# Altium footprint library Footprint-Lib-PhilsLab.PcbLib: 352 footprints (part 4 of 22)
Each footprint in its own frame and in the unit in brackets; x right, y up, seen from the top. Pads: shape width x height; smd on the part's side, far side on the other; paste and mask are expansions set on the pad; w line width, h text height; cw(c..) or ccw(c..) is an arc to the next point about the centre after c.
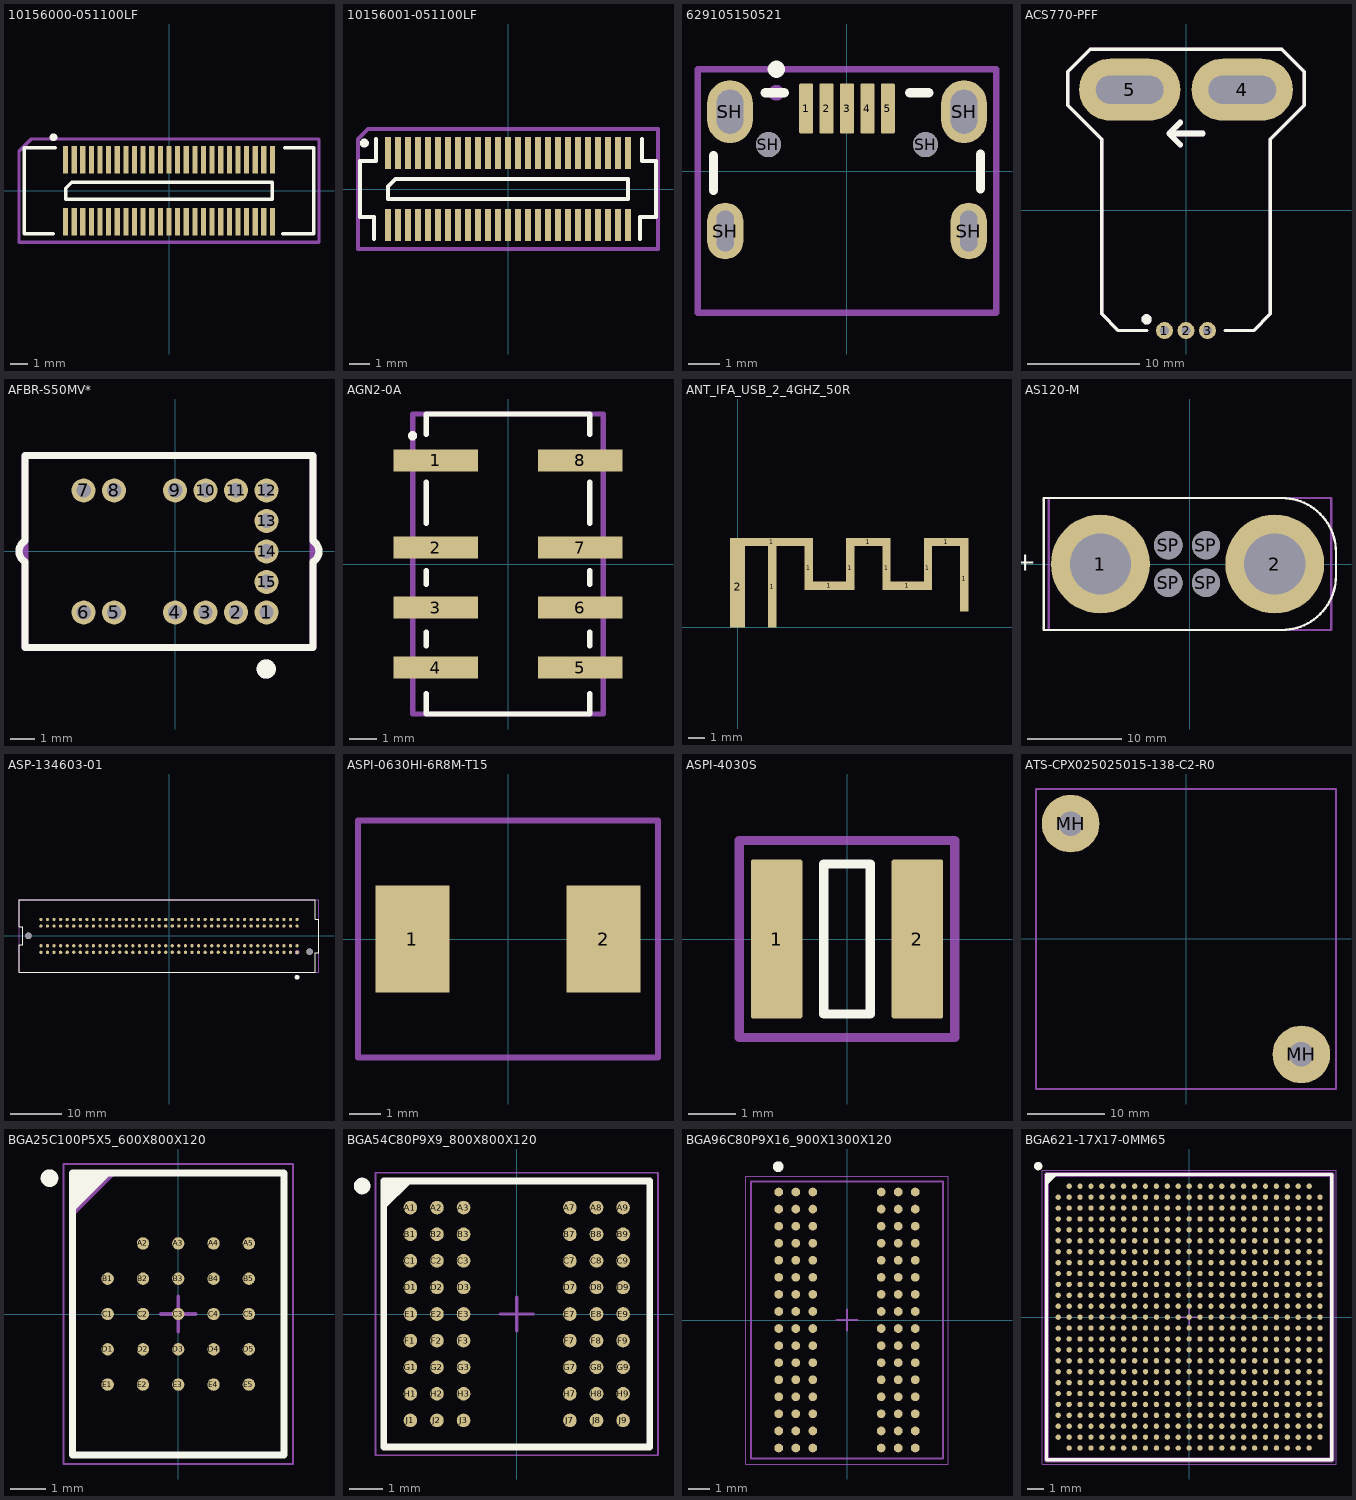
[diagram p3: the footprints below, top view; thin cyan lines are the x and y axes]

## 10156000-051100LF [mm]
pads (50):
  rect 0.3x1.6 smd mask+0.05: 1(-6,1.8) 2(-5.5,1.8) 3(-5,1.8) 4(-4.5,1.8) 5(-4,1.8) 6(-3.5,1.8) 7(-3,1.8) 8(-2.5,1.8) 9(-2,1.8) 10(-1.5,1.8) 11(-1,1.8) 12(-0.5,1.8) 13(0,1.8) 14(0.5,1.8) 15(1,1.8) 16(1.5,1.8) 17(2,1.8) 18(2.5,1.8) 19(3,1.8) 20(3.5,1.8) 21(4,1.8) 22(4.5,1.8) 23(5,1.8) 24(5.5,1.8) 25(6,1.8) 26(6,-1.8) 27(5.5,-1.8) 28(5,-1.8) 29(4.5,-1.8) 30(4,-1.8) 31(3.5,-1.8) 32(3,-1.8) 33(2.5,-1.8) 34(2,-1.8) 35(1.5,-1.8) 36(1,-1.8) 37(0.5,-1.8) 38(0,-1.8) 39(-0.5,-1.8) 40(-1,-1.8) 41(-1.5,-1.8) 42(-2,-1.8) 43(-2.5,-1.8) 44(-3,-1.8) 45(-3.5,-1.8) 46(-4,-1.8) 47(-4.5,-1.8) 48(-5,-1.8) 49(-5.5,-1.8) 50(-6,-1.8)
Top Overlay:
  circle w0.25: c-6.7,3.1 r0.1
  lines w0.2: -6.7,-2.5 -8.4,-2.5 -8.4,2.5 -6.6,2.5 ; 6.6,-2.5 8.4,-2.5 8.4,2.5 6.7,2.5 ; -6,-0.5 6,-0.5 6,0.5 -5.635,0.5 -6,0.135 -6,-0.5
Mechanical 13:
  lines w0.2: -8.7,-3 -8.7,-0.4 -8.7,2.3 -8,3 8.7,3 8.7,-3 -8.7,-3
  text "'.Designator'" at -7.947,-1.41 h0.8
3D body "10156000-051100LF.stp": height 2.76, standoff 0.01, extent -8.15,-2.3 8.15,2.3

## 10156001-051100LF [mm]
pads (50):
  rect 0.3x1.6 smd mask+0.05: 1(-6,1.8) 2(-5.5,1.8) 3(-5,1.8) 4(-4.5,1.8) 5(-4,1.8) 6(-3.5,1.8) 7(-3,1.8) 8(-2.5,1.8) 9(-2,1.8) 10(-1.5,1.8) 11(-1,1.8) 12(-0.5,1.8) 13(0,1.8) 14(0.5,1.8) 15(1,1.8) 16(1.5,1.8) 17(2,1.8) 18(2.5,1.8) 19(3,1.8) 20(3.5,1.8) 21(4,1.8) 22(4.5,1.8) 23(5,1.8) 24(5.5,1.8) 25(6,1.8) 26(6,-1.8) 27(5.5,-1.8) 28(5,-1.8) 29(4.5,-1.8) 30(4,-1.8) 31(3.5,-1.8) 32(3,-1.8) 33(2.5,-1.8) 34(2,-1.8) 35(1.5,-1.8) 36(1,-1.8) 37(0.5,-1.8) 38(0,-1.8) 39(-0.5,-1.8) 40(-1,-1.8) 41(-1.5,-1.8) 42(-2,-1.8) 43(-2.5,-1.8) 44(-3,-1.8) 45(-3.5,-1.8) 46(-4,-1.8) 47(-4.5,-1.8) 48(-5,-1.8) 49(-5.5,-1.8) 50(-6,-1.8)
Top Overlay:
  circle w0.25: c-7.185,2.298 r0.1
  lines w0.2: -6.7,-2.5 -6.7,-1.4 -7.4,-1.4 -7.4,1.4 -6.6,1.4 -6.6,2.5 ; 6.6,-2.5 6.6,-1.4 7.4,-1.4 7.4,1.4 6.7,1.4 6.7,2.5 ; -6,-0.5 6,-0.5 6,0.5 -5.635,0.5 -6,0.135 -6,-0.5
Mechanical 13:
  lines w0.2: -7.5,-3 -7.5,-1 -7.5,2.5 -7,3 7.5,3 7.5,-3 -7.5,-3
  text "'.Designator'" at -7.947,-1.41 h0.8
3D body "10156001-051100LF.stp": height 2.8, standoff 0.01, extent -7.175,-2.3 7.175,2.3

## 629105150521 [mm]
height 2.35
pads (11):
  rrect25% 0.45x1.6 smd mask+0.12: 1(-1.3,2) 2(-0.65,2) 3(0,2) 4(0.65,2) 5(1.3,2)
  oval 1.15x1.8 hole 0.55 slot 1.3 at 90 deg: SH(-3.875,-1.9) SH(3.875,-1.9)
  oval 1.45x2 hole 0.85 slot 1.4 at 90 deg mask+0.15: SH(-3.725,1.9) SH(3.725,1.9)
  round 0.8 hole 0.8 unplated mask+0.3: SH(-2.5,0.85) SH(2.5,0.85)
Top Overlay:
  circle w0.3: c-2.25,3.25 r0.125
  lines w0.3: -4.25,-0.6 -4.25,0.5 ; -2.6,2.5 -2,2.5 ; 2,2.5 2.6,2.5 ; 4.25,-0.55 4.25,0.55
Mechanical 13:
  circle w0.3: c-2.25,2.5 r0.1
  lines w0.2: -4.75,-4.5 -4.75,3.25 4.75,3.25 4.75,-4.5 -4.75,-4.5
  text ".Designator" at -4.998,-0.333 h1
3D body "629105150521.stp": height 2.78, standoff -1.75, extent -4,-4.3 4,2.303

## ACS770-PFF [mm]
pads (5):
  round 1.5 hole 0.8: 1(-1.91,-10.7) 2(0,-10.7) 3(1.91,-10.7)
  oval 9x5.5 hole 2.5 slot 6 at 0 deg: 4(5,10.7) 5(-5,10.7)
Top Overlay:
  circle w0.5: c-3.5,-9.7 r0.203
  lines w0.3: -3.5,-10.7 -6,-10.7 -7.5,-9.2 -7.5,0.8 -7.5,6.3 -10.5,9.3 -10.5,12.3 -8.5,14.3 0,14.3 8.5,14.3 10.5,12.3 10.5,9.3 8.5,7.3 7.5,6.3 7.5,-9.2 6,-10.7 3.5,-10.7
  lines w0.5: -0.5,5.8 -1.5,6.8 ; -0.5,7.8 -1.5,6.8 ; 1.5,6.8 -1.5,6.8
Mechanical 13:
  circle w0.5: c-3.5,-9.7 r0.203
  lines w0.3: -3.5,-10.7 -6,-10.7 -7.5,-9.2 -7.5,0.8 -7.5,6.3 -10.5,9.3 -10.5,12.3 -8.5,14.3 0,14.3 8.5,14.3 10.5,12.3 10.5,9.3 8.5,7.3 7.5,6.3 7.5,-9.2 6,-10.7 3.5,-10.7
  lines w0.5: -0.5,5.8 -1.5,6.8 ; -0.5,7.8 -1.5,6.8 ; 1.5,6.8 -1.5,6.8
  text "'.Designator'" at -6.315,-1.4 h1
3D body "ACS770-PFF.STEP": height 7.01, standoff -3.52, extent -7.002,-11.214 6.998,11.603

## AFBR-S50MV* [mm]
pads (15):
  round 1 hole 0.6: 1(3.81,-2.54) 2(2.54,-2.54) 3(1.27,-2.54) 4(0,-2.54) 5(-2.54,-2.54) 6(-3.81,-2.54) 7(-3.81,2.54) 8(-2.54,2.54) 9(0,2.54) 10(1.27,2.54) 11(2.54,2.54) 12(3.81,2.54) 13(3.81,1.27) 14(3.81,0) 15(3.81,-1.27)
Top Overlay:
  circle w0.5: c3.8,-4.9 r0.15
  lines w0.3: -6.254,-0.43 cw(c-6,0) -6.251,0.432 ; -6.25,-0.5 -6.25,-4 5.75,-4 5.75,-0.435 ccw(c5.747,-0.435) 5.747,-0.432 ccw(c5.496,0) 5.75,0.43 5.75,4 -6.25,4 -6.25,0.5
Mechanical 13:
  circle w0.5: c3.8,-4.9 r0.15
  lines w0.3: -6.25,-4 5.75,-4 5.75,4 -6.25,4 -6.25,-4
  text "'.Designator'" at -5.665,-0.417 h1
3D body "AFBR-S50MV85G.stp": height 7.71, standoff -4.29, extent -6.42,-3.8 5.98,3.8

## AGN2-0A [mm]
pads (8):
  rect 3.1x0.8 smd: 1(-2.65,3.8) 2(-2.65,0.6) 3(-2.65,-1.6) 4(-2.65,-3.8) 5(2.65,-3.8) 6(2.65,-1.6) 7(2.65,0.6) 8(2.65,3.8)
Top Overlay:
  circle w0.3: c-3.5,4.7 r0.021
  lines w0.2: -3,-4.75 -3,-5.5 3,-5.5 3,-4.75 ; -3,-3 -3,-2.5 ; -3,-0.75 -3,-0.25 ; -3,1.5 -3,3 ; -3,4.75 -3,5.5 3,5.5 3,4.75 ; 3,-3 3,-2.5 ; 3,-0.75 3,-0.25 ; 3,1.5 3,3
Mechanical 13:
  circle w0.3: c-2.2,3.8 r0.108
  lines w0.2: -3.5,-5.5 -3.5,5.5 3.5,5.5 3.5,-5.5 -3.5,-5.5
  text ".Designator" at -4.998,-0.333 h1
3D body "agn210a12.step": height 10.04, standoff 0.04, extent -3.7,-5.3 3.7,5.3

## ANT_IFA_USB_2_4GHZ_50R [mm]
pads (12):
  rect 5x0.5 smd paste-2539.97 mask+0.102: 1(2.05,5.15)
  rect 0.5x4.9 smd paste-2539.97 mask+0.102: 1(2.1,2.45)
  rect 0.5x2.64 smd paste-2539.97 mask+0.102: 1(4.3,3.58) 1(6.8,3.58) 1(9,3.58) 1(11.5,3.58)
  rect 2x0.5 smd paste-2539.97 mask+0.102: 1(5.55,2.51) 1(10.25,2.51)
  rect 2.7x0.5 smd paste-2539.97 mask+0.102: 1(7.9,5.15) 1(12.6,5.15)
  rect 0.5x3.94 smd paste-2539.97 mask+0.102: 1(13.7,2.93)
  rect 0.9x4.9 smd paste-2539.97 mask+0.102: 2(0,2.45)

## AS120-M [mm]
pads (6):
  round 10.5 hole 6.5: 1(-9.5,0) 2(9,0)
  round 3 hole 3 unplated: SP(-2.3,-2) SP(-2.3,2) SP(1.7,-2) SP(1.7,2)
Top Overlay:
  lines w0.254: -15.5,-7 -15.5,0 -15.5,7 9.764,7 cw(c9.764,1.264) 15.5,1.264 15.5,-1.264 cw(c9.764,-1.264) 9.764,-7 -15.5,-7
  text "+" at -16.334,1 h2
Mechanical 13:
  lines w0.254: -15,-7 -15,7 15,7 15,-7 -15,-7
  text "'.Designator'" at -5.665,-0.417 h1
  text "+" at -10.5,-1.5 h3
3D body "AS120-M.STEP": height 26, standoff -5, extent -14.975,-6.7 15,6.7

## ASP-134603-01 [mm]
height 6.55
pads (162):
  round 0.64 smd: C1(24.765,-3.175) C2(23.495,-3.175) C3(22.225,-3.175) C4(20.955,-3.175) C5(19.685,-3.175) C6(18.415,-3.175) C7(17.145,-3.175) C8(15.875,-3.175) C9(14.605,-3.175) C10(13.335,-3.175) C11(12.065,-3.175) C12(10.795,-3.175) C13(9.525,-3.175) C14(8.255,-3.175) C15(6.985,-3.175) C16(5.715,-3.175) C17(4.445,-3.175) C18(3.175,-3.175) C19(1.905,-3.175) C20(0.635,-3.175) C21(-0.635,-3.175) C22(-1.905,-3.175) C23(-3.175,-3.175) C24(-4.445,-3.175) C25(-5.715,-3.175) C26(-6.985,-3.175) C27(-8.255,-3.175) C28(-9.525,-3.175) C29(-10.795,-3.175) C30(-12.065,-3.175) C31(-13.335,-3.175) C32(-14.605,-3.175) C33(-15.875,-3.175) C34(-17.145,-3.175) C35(-18.415,-3.175) C36(-19.685,-3.175) C37(-20.955,-3.175) C38(-22.225,-3.175) C39(-23.495,-3.175) C40(-24.765,-3.175) D1(24.765,-1.905) D2(23.495,-1.905) D3(22.225,-1.905) D4(20.955,-1.905) D5(19.685,-1.905) D6(18.415,-1.905) D7(17.145,-1.905) D8(15.875,-1.905) D9(14.605,-1.905) D10(13.335,-1.905) D11(12.065,-1.905) D12(10.795,-1.905) D13(9.525,-1.905) D14(8.255,-1.905) D15(6.985,-1.905) D16(5.715,-1.905) D17(4.445,-1.905) D18(3.175,-1.905) D19(1.905,-1.905) D20(0.635,-1.905) D21(-0.635,-1.905) D22(-1.905,-1.905) D23(-3.175,-1.905) D24(-4.445,-1.905) D25(-5.715,-1.905) D26(-6.985,-1.905) D27(-8.255,-1.905) D28(-9.525,-1.905) D29(-10.795,-1.905) D30(-12.065,-1.905) D31(-13.335,-1.905) D32(-14.605,-1.905) D33(-15.875,-1.905) D34(-17.145,-1.905) D35(-18.415,-1.905) D36(-19.685,-1.905) D37(-20.955,-1.905) D38(-22.225,-1.905) D39(-23.495,-1.905) D40(-24.765,-1.905) G1(24.765,1.905) G2(23.495,1.905) G3(22.225,1.905) G4(20.955,1.905) G5(19.685,1.905) G6(18.415,1.905) G7(17.145,1.905) G8(15.875,1.905) G9(14.605,1.905) G10(13.335,1.905) G11(12.065,1.905) G12(10.795,1.905) G13(9.525,1.905) G14(8.255,1.905) G15(6.985,1.905) G16(5.715,1.905) G17(4.445,1.905) G18(3.175,1.905) G19(1.905,1.905) G20(0.635,1.905) G21(-0.635,1.905) G22(-1.905,1.905) G23(-3.175,1.905) G24(-4.445,1.905) G25(-5.715,1.905) G26(-6.985,1.905) G27(-8.255,1.905) G28(-9.525,1.905) G29(-10.795,1.905) G30(-12.065,1.905) G31(-13.335,1.905) G32(-14.605,1.905) G33(-15.875,1.905) G34(-17.145,1.905) G35(-18.415,1.905) G36(-19.685,1.905) G37(-20.955,1.905) G38(-22.225,1.905) G39(-23.495,1.905) G40(-24.765,1.905) H1(24.765,3.175) H2(23.495,3.175) H3(22.225,3.175) H4(20.955,3.175) H5(19.685,3.175) H6(18.415,3.175) H7(17.145,3.175) H8(15.875,3.175) H9(14.605,3.175) H10(13.335,3.175) H11(12.065,3.175) H12(10.795,3.175) H13(9.525,3.175) H14(8.255,3.175) H15(6.985,3.175) H16(5.715,3.175) H17(4.445,3.175) H18(3.175,3.175) H19(1.905,3.175) H20(0.635,3.175) H21(-0.635,3.175) H22(-1.905,3.175) H23(-3.175,3.175) H24(-4.445,3.175) H25(-5.715,3.175) H26(-6.985,3.175) H27(-8.255,3.175) H28(-9.525,3.175) H29(-10.795,3.175) H30(-12.065,3.175) H31(-13.335,3.175) H32(-14.605,3.175) H33(-15.875,3.175) H34(-17.145,3.175) H35(-18.415,3.175) H36(-19.685,3.175) H37(-20.955,3.175) H38(-22.225,3.175) H39(-23.495,3.175) H40(-24.765,3.175)
  round 1.27 hole 1.27 unplated: MH(-27.18,0) MH(27.18,-3.05)
Top Overlay:
  circle w0.5: c24.75,-8 r0.2
  lines w0.2: -29,-7 -29,-1.75 -28.25,-1.75 -28.25,1.75 -29,1.75 -29,7 0,7 28.25,7 28.25,3.25 29,3.25 29,-3.25 28.25,-3.25 28.25,-7 0,-7 -29,-7
Mechanical 13:
  circle w0.5: c24.765,-3.175 r0.2
  lines w0.2: -29,-7 -29,7 29,7 29,-7 -29,-7
  text "'.Designator'" at -5.665,-0.417 h1
3D body "ASP-134603-01.stp": height 6.57, standoff -1.26, extent -28.727,-6.642 28.727,6.642

## ASPI-0630HI-6R8M-T15 [mm]
pads (2):
  rect 2.35x3.4 smd: 1(-3.025,0) 2(3.025,0)
Mechanical 13:
  lines w0.2: -4.75,-3.75 -4.75,-2 -4.75,3.75 4.75,3.75 4.75,-3.75 -4.75,-3.75
  text "'.Designator'" at -4.682,-0.75 h0.8
3D body "ASPI-0630HI.STEP": height 3.01, standoff 0.01, extent -3.6,-3.325 3.6,3.325

## ASPI-4030S [mm]
pads (2):
  rrect10% 1.1x3.4 smd: 1(-1.5,0) 2(1.5,0)
Top Overlay:
  lines w0.2: -0.5,-1.6 -0.5,1.6 0.5,1.6 0.5,-1.6 -0.5,-1.6
Mechanical 13:
  lines w0.2: -2.3,-2.1 -2.3,2.1 2.3,2.1 2.3,-2.1 0,-2.1 -2.3,-2.1
  text ".Designator" at -4.998,-0.333 h1
3D body "ASPI-4030S.STEP": height 3.01, standoff 0.01, extent -2,-2 2,2

## ATS-CPX025025015-138-C2-R0 [mm]
pads (2):
  round 7.5 hole 3.175: MH(-15,15) MH(15,-15)
Mechanical 13:
  lines w0.2: -19.5,-19.5 -19.5,19.5 19.5,19.5 19.5,-19.5 -19.5,-19.5
  text "'.Designator'" at -5.665,-0.417 h1
3D body "ATS-CPX-138-CX-R0_FUSED.STEP": height 18.5, standoff 3.5, extent -18.996,-18.996 18.996,18.996

## BGA25C100P5X5_600X800X120 [mm] "BGA, 25-Leads, Body 6.00x8.00mmx1.20mm, Pitch 1.00mm"
height 1.2
pads (24):
  round 0.35 smd: A2(-1,2) A3(0,2) A4(1,2) A5(2,2) B1(-2,1) B2(-1,1) B3(0,1) B4(1,1) B5(2,1) C1(-2,0) C2(-1,0) C3(0,0) C4(1,0) C5(2,0) D1(-2,-1) D2(-1,-1) D3(0,-1) D4(1,-1) D5(2,-1) E1(-2,-2) E2(-1,-2) E3(0,-2) E4(1,-2) E5(2,-2)
Top Overlay:
  circle w0.25: c-3.65,3.85 r0.125
  region: -2,4 -3,3 -3,4
  lines w0.2: -3,3 -2,4 ; -3,-4 3,-4 3,4 -3,4 -3,-4
Mechanical 13:
  lines w0.1: -3,-4 -3,2.8 -1.8,4 3,4 3,-4 -3,-4
  text "'.Designator'" at -5.84,-0.925 h1
Mechanical 15:
  lines w0.05: -3.25,-4.25 3.25,-4.25 3.25,4.25 -3.25,4.25 -3.25,-4.25
  lines w0.1: -0.5,0 0.5,0 ; 0,-0.5 0,0.5
3D body "BGA25C100P5X5_600X800X120.step": height 1.2, standoff 0, extent -3,-4 3,4

## BGA54C80P9X9_800X800X120 [mm] "BGA, 54-Leads, Body 8.00x8.00mmx1.20mm, Pitch 0.80mm"
height 1.2
pads (54):
  round 0.41 smd: A1(-3.2,3.2) A2(-2.4,3.2) A3(-1.6,3.2) A7(1.6,3.2) A8(2.4,3.2) A9(3.2,3.2) B1(-3.2,2.4) B2(-2.4,2.4) B3(-1.6,2.4) B7(1.6,2.4) B8(2.4,2.4) B9(3.2,2.4) C1(-3.2,1.6) C2(-2.4,1.6) C3(-1.6,1.6) C7(1.6,1.6) C8(2.4,1.6) C9(3.2,1.6) D1(-3.2,0.8) D2(-2.4,0.8) D3(-1.6,0.8) D7(1.6,0.8) D8(2.4,0.8) D9(3.2,0.8) E1(-3.2,0) E2(-2.4,0) E3(-1.6,0) E7(1.6,0) E8(2.4,0) E9(3.2,0) F1(-3.2,-0.8) F2(-2.4,-0.8) F3(-1.6,-0.8) F7(1.6,-0.8) F8(2.4,-0.8) F9(3.2,-0.8) G1(-3.2,-1.6) G2(-2.4,-1.6) G3(-1.6,-1.6) G7(1.6,-1.6) G8(2.4,-1.6) G9(3.2,-1.6) H1(-3.2,-2.4) H2(-2.4,-2.4) H3(-1.6,-2.4) H7(1.6,-2.4) H8(2.4,-2.4) H9(3.2,-2.4) J1(-3.2,-3.2) J2(-2.4,-3.2) J3(-1.6,-3.2) J7(1.6,-3.2) J8(2.4,-3.2) J9(3.2,-3.2)
Top Overlay:
  circle w0.25: c-4.65,3.85 r0.125
  region: -3.256,4 -4,3.256 -4,4
  lines w0.2: -4,3.256 -3.256,4 ; -4,-4 4,-4 4,4 -4,4 -4,-4
Mechanical 13:
  lines w0.1: -4,-4 4,-4 4,4 -4,4 -4,-4
  text "'.Designator'" at -5.815,-0.9 h1
Mechanical 15:
  lines w0.05: -4.25,-4.25 4.25,-4.25 4.25,4.25 -4.25,4.25 -4.25,-4.25
  lines w0.1: -0.5,0 0.5,0 ; 0,-0.5 0,0.5
3D body "BGA54C80P9X9_800X800X120.step": height 1.2, standoff 0, extent -4,-4 4,4

## BGA96C80P9X16_900X1300X120 [mm] "BGA, 96-Leads, Body 9.00x13.00mmx1.20mm, Pitch 0.80mm"
height 1.2
pads (96):
  round 0.41 smd mask+0.05: A1(-3.2,6) A2(-2.4,6) A3(-1.6,6) A7(1.6,6) A8(2.4,6) A9(3.2,6) B1(-3.2,5.2) B2(-2.4,5.2) B3(-1.6,5.2) B7(1.6,5.2) B8(2.4,5.2) B9(3.2,5.2) C1(-3.2,4.4) C2(-2.4,4.4) C3(-1.6,4.4) C7(1.6,4.4) C8(2.4,4.4) C9(3.2,4.4) D1(-3.2,3.6) D2(-2.4,3.6) D3(-1.6,3.6) D7(1.6,3.6) D8(2.4,3.6) D9(3.2,3.6) E1(-3.2,2.8) E2(-2.4,2.8) E3(-1.6,2.8) E7(1.6,2.8) E8(2.4,2.8) E9(3.2,2.8) F1(-3.2,2) F2(-2.4,2) F3(-1.6,2) F7(1.6,2) F8(2.4,2) F9(3.2,2) G1(-3.2,1.2) G2(-2.4,1.2) G3(-1.6,1.2) G7(1.6,1.2) G8(2.4,1.2) G9(3.2,1.2) H1(-3.2,0.4) H2(-2.4,0.4) H3(-1.6,0.4) H7(1.6,0.4) H8(2.4,0.4) H9(3.2,0.4) J1(-3.2,-0.4) J2(-2.4,-0.4) J3(-1.6,-0.4) J7(1.6,-0.4) J8(2.4,-0.4) J9(3.2,-0.4) K1(-3.2,-1.2) K2(-2.4,-1.2) K3(-1.6,-1.2) K7(1.6,-1.2) K8(2.4,-1.2) K9(3.2,-1.2) L1(-3.2,-2) L2(-2.4,-2) L3(-1.6,-2) L7(1.6,-2) L8(2.4,-2) L9(3.2,-2) M1(-3.2,-2.8) M2(-2.4,-2.8) M3(-1.6,-2.8) M7(1.6,-2.8) M8(2.4,-2.8) M9(3.2,-2.8) N1(-3.2,-3.6) N2(-2.4,-3.6) N3(-1.6,-3.6) N7(1.6,-3.6) N8(2.4,-3.6) N9(3.2,-3.6) P1(-3.2,-4.4) P2(-2.4,-4.4) P3(-1.6,-4.4) P7(1.6,-4.4) P8(2.4,-4.4) P9(3.2,-4.4) R1(-3.2,-5.2) R2(-2.4,-5.2) R3(-1.6,-5.2) R7(1.6,-5.2) R8(2.4,-5.2) R9(3.2,-5.2) T1(-3.2,-6) T2(-2.4,-6) T3(-1.6,-6) T7(1.6,-6) T8(2.4,-6) T9(3.2,-6)
Top Overlay:
  circle w0.25: c-3.226,7.188 r0.125
Mechanical 13:
  lines w0.1: -4.5,-6.5 4.5,-6.5 4.5,6.5 -4.5,6.5 -4.5,-6.5
  text "'.Designator'" at -5.84,-0.925 h1
Mechanical 15:
  lines w0.05: -4.75,-6.75 4.75,-6.75 4.75,6.75 -4.75,6.75 -4.75,-6.75
  lines w0.1: -0.5,0 0.5,0 ; 0,-0.5 0,0.5
3D body "BGA96C80P9X16_900X1300X120.step": height 1.2, standoff 0, extent -4.5,-6.5 4.5,6.5

## BGA621-17X17-0MM65 [mm]
height 2.18
pads (621):
  round 0.32 smd mask+0.07: A2(-7.15,7.8) A3(-6.5,7.8) A4(-5.85,7.8) A5(-5.2,7.8) A6(-4.55,7.8) A7(-3.9,7.8) A8(-3.25,7.8) A9(-2.6,7.8) A10(-1.95,7.8) A11(-1.3,7.8) A12(-0.65,7.8) A13(0,7.8) A14(0.65,7.8) A15(1.3,7.8) A16(1.95,7.8) A17(2.6,7.8) A18(3.25,7.8) A19(3.9,7.8) A20(4.55,7.8) A21(5.2,7.8) A22(5.85,7.8) A23(6.5,7.8) A24(7.15,7.8) AA1(-7.8,-5.2) AA2(-7.15,-5.2) AA3(-6.5,-5.2) AA4(-5.85,-5.2) AA5(-5.2,-5.2) AA6(-4.55,-5.2) AA7(-3.9,-5.2) AA8(-3.25,-5.2) AA9(-2.6,-5.2) AA10(-1.95,-5.2) AA11(-1.3,-5.2) AA12(-0.65,-5.2) AA13(0,-5.2) AA14(0.65,-5.2) AA15(1.3,-5.2) AA16(1.95,-5.2) AA17(2.6,-5.2) AA18(3.25,-5.2) AA19(3.9,-5.2) AA20(4.55,-5.2) AA21(5.2,-5.2) AA22(5.85,-5.2) AA23(6.5,-5.2) AA24(7.15,-5.2) AA25(7.8,-5.2) AB1(-7.8,-5.85) AB2(-7.15,-5.85) AB3(-6.5,-5.85) AB4(-5.85,-5.85) AB5(-5.2,-5.85) AB6(-4.55,-5.85) AB7(-3.9,-5.85) AB8(-3.25,-5.85) AB9(-2.6,-5.85) AB10(-1.95,-5.85) AB11(-1.3,-5.85) AB12(-0.65,-5.85) AB13(0,-5.85) AB14(0.65,-5.85) AB15(1.3,-5.85) AB16(1.95,-5.85) AB17(2.6,-5.85) AB18(3.25,-5.85) AB19(3.9,-5.85) AB20(4.55,-5.85) AB21(5.2,-5.85) AB22(5.85,-5.85) AB23(6.5,-5.85) AB24(7.15,-5.85) AB25(7.8,-5.85) AC1(-7.8,-6.5) AC2(-7.15,-6.5) AC3(-6.5,-6.5) AC4(-5.85,-6.5) AC5(-5.2,-6.5) AC6(-4.55,-6.5) AC7(-3.9,-6.5) AC8(-3.25,-6.5) AC9(-2.6,-6.5) AC10(-1.95,-6.5) AC11(-1.3,-6.5) AC12(-0.65,-6.5) AC13(0,-6.5) AC14(0.65,-6.5) AC15(1.3,-6.5) AC16(1.95,-6.5) AC17(2.6,-6.5) AC18(3.25,-6.5) AC19(3.9,-6.5) AC20(4.55,-6.5) AC21(5.2,-6.5) AC22(5.85,-6.5) AC23(6.5,-6.5) AC24(7.15,-6.5) AC25(7.8,-6.5) AD1(-7.8,-7.15) AD2(-7.15,-7.15) AD3(-6.5,-7.15) AD4(-5.85,-7.15) AD5(-5.2,-7.15) AD6(-4.55,-7.15) AD7(-3.9,-7.15) AD8(-3.25,-7.15) AD9(-2.6,-7.15) AD10(-1.95,-7.15) AD11(-1.3,-7.15) AD12(-0.65,-7.15) AD13(0,-7.15) AD14(0.65,-7.15) AD15(1.3,-7.15) AD16(1.95,-7.15) AD17(2.6,-7.15) AD18(3.25,-7.15) AD19(3.9,-7.15) AD20(4.55,-7.15) AD21(5.2,-7.15) AD22(5.85,-7.15) AD23(6.5,-7.15) AD24(7.15,-7.15) AD25(7.8,-7.15) AE2(-7.15,-7.8) AE3(-6.5,-7.8) AE4(-5.85,-7.8) AE5(-5.2,-7.8) AE6(-4.55,-7.8) AE7(-3.9,-7.8) AE8(-3.25,-7.8) AE9(-2.6,-7.8) AE10(-1.95,-7.8) AE11(-1.3,-7.8) AE12(-0.65,-7.8) AE13(0,-7.8) AE14(0.65,-7.8) AE15(1.3,-7.8) AE16(1.95,-7.8) AE17(2.6,-7.8) AE18(3.25,-7.8) AE19(3.9,-7.8) AE20(4.55,-7.8) AE21(5.2,-7.8) AE22(5.85,-7.8) AE23(6.5,-7.8) AE24(7.15,-7.8) B1(-7.8,7.15) B2(-7.15,7.15) B3(-6.5,7.15) B4(-5.85,7.15) B5(-5.2,7.15) B6(-4.55,7.15) B7(-3.9,7.15) B8(-3.25,7.15) B9(-2.6,7.15) B10(-1.95,7.15) B11(-1.3,7.15) B12(-0.65,7.15) B13(0,7.15) B14(0.65,7.15) B15(1.3,7.15) B16(1.95,7.15) B17(2.6,7.15) B18(3.25,7.15) B19(3.9,7.15) B20(4.55,7.15) B21(5.2,7.15) B22(5.85,7.15) B23(6.5,7.15) B24(7.15,7.15) B25(7.8,7.15) C1(-7.8,6.5) C2(-7.15,6.5) C3(-6.5,6.5) C4(-5.85,6.5) C5(-5.2,6.5) C6(-4.55,6.5) C7(-3.9,6.5) C8(-3.25,6.5) C9(-2.6,6.5) C10(-1.95,6.5) C11(-1.3,6.5) C12(-0.65,6.5) C13(0,6.5) C14(0.65,6.5) C15(1.3,6.5) C16(1.95,6.5) C17(2.6,6.5) C18(3.25,6.5) C19(3.9,6.5) C20(4.55,6.5) C21(5.2,6.5) C22(5.85,6.5) C23(6.5,6.5) C24(7.15,6.5) C25(7.8,6.5) D1(-7.8,5.85) D2(-7.15,5.85) D3(-6.5,5.85) D4(-5.85,5.85) D5(-5.2,5.85) D6(-4.55,5.85) D7(-3.9,5.85) D8(-3.25,5.85) D9(-2.6,5.85) D10(-1.95,5.85) D11(-1.3,5.85) D12(-0.65,5.85) D13(0,5.85) D14(0.65,5.85) D15(1.3,5.85) D16(1.95,5.85) D17(2.6,5.85) D18(3.25,5.85) D19(3.9,5.85) D20(4.55,5.85) D21(5.2,5.85) D22(5.85,5.85) D23(6.5,5.85) D24(7.15,5.85) D25(7.8,5.85) E1(-7.8,5.2) E2(-7.15,5.2) E3(-6.5,5.2) E4(-5.85,5.2) E5(-5.2,5.2) E6(-4.55,5.2) E7(-3.9,5.2) E8(-3.25,5.2) E9(-2.6,5.2) E10(-1.95,5.2) E11(-1.3,5.2) E12(-0.65,5.2) E13(0,5.2) E14(0.65,5.2) E15(1.3,5.2) E16(1.95,5.2) E17(2.6,5.2) E18(3.25,5.2) E19(3.9,5.2) E20(4.55,5.2) E21(5.2,5.2) E22(5.85,5.2) E23(6.5,5.2) E24(7.15,5.2) E25(7.8,5.2) F1(-7.8,4.55) F2(-7.15,4.55) F3(-6.5,4.55) F4(-5.85,4.55) F5(-5.2,4.55) F6(-4.55,4.55) F7(-3.9,4.55) F8(-3.25,4.55) F9(-2.6,4.55) F10(-1.95,4.55) F11(-1.3,4.55) F12(-0.65,4.55) F13(0,4.55) F14(0.65,4.55) F15(1.3,4.55) F16(1.95,4.55) F17(2.6,4.55) F18(3.25,4.55) F19(3.9,4.55) F20(4.55,4.55) F21(5.2,4.55) F22(5.85,4.55) F23(6.5,4.55) F24(7.15,4.55) F25(7.8,4.55) G1(-7.8,3.9) G2(-7.15,3.9) G3(-6.5,3.9) G4(-5.85,3.9) G5(-5.2,3.9) G6(-4.55,3.9) G7(-3.9,3.9) G8(-3.25,3.9) G9(-2.6,3.9) G10(-1.95,3.9) G11(-1.3,3.9) G12(-0.65,3.9) G13(0,3.9) G14(0.65,3.9) G15(1.3,3.9) G16(1.95,3.9) G17(2.6,3.9) G18(3.25,3.9) G19(3.9,3.9) G20(4.55,3.9) G21(5.2,3.9) G22(5.85,3.9) G23(6.5,3.9) G24(7.15,3.9) G25(7.8,3.9) H1(-7.8,3.25) H2(-7.15,3.25) H3(-6.5,3.25) H4(-5.85,3.25) H5(-5.2,3.25) H6(-4.55,3.25) H7(-3.9,3.25) H8(-3.25,3.25) H9(-2.6,3.25) H10(-1.95,3.25) H11(-1.3,3.25) H12(-0.65,3.25) H13(0,3.25) H14(0.65,3.25) H15(1.3,3.25) H16(1.95,3.25) H17(2.6,3.25) H18(3.25,3.25) H19(3.9,3.25) H20(4.55,3.25) H21(5.2,3.25) H22(5.85,3.25) H23(6.5,3.25) H24(7.15,3.25) H25(7.8,3.25) J1(-7.8,2.6) J2(-7.15,2.6) J3(-6.5,2.6) J4(-5.85,2.6) J5(-5.2,2.6) J6(-4.55,2.6) J7(-3.9,2.6) J8(-3.25,2.6) J9(-2.6,2.6) J10(-1.95,2.6) J11(-1.3,2.6) J12(-0.65,2.6) J13(0,2.6) J14(0.65,2.6) J15(1.3,2.6) J16(1.95,2.6) J17(2.6,2.6) J18(3.25,2.6) J19(3.9,2.6) J20(4.55,2.6) J21(5.2,2.6) J22(5.85,2.6) J23(6.5,2.6) J24(7.15,2.6) J25(7.8,2.6) K1(-7.8,1.95) K2(-7.15,1.95) K3(-6.5,1.95) K4(-5.85,1.95) K5(-5.2,1.95) K6(-4.55,1.95) K7(-3.9,1.95) K8(-3.25,1.95) K9(-2.6,1.95) K10(-1.95,1.95) K11(-1.3,1.95) K12(-0.65,1.95) K13(0,1.95) K14(0.65,1.95) K15(1.3,1.95) K16(1.95,1.95) K17(2.6,1.95) K18(3.25,1.95) K19(3.9,1.95) K20(4.55,1.95) K21(5.2,1.95) K22(5.85,1.95) K23(6.5,1.95) K24(7.15,1.95) K25(7.8,1.95) L1(-7.8,1.3) L2(-7.15,1.3) L3(-6.5,1.3) L4(-5.85,1.3) L5(-5.2,1.3) L6(-4.55,1.3) L7(-3.9,1.3) L8(-3.25,1.3) L9(-2.6,1.3) L10(-1.95,1.3) L11(-1.3,1.3) L12(-0.65,1.3) L13(0,1.3) L14(0.65,1.3) L15(1.3,1.3) L16(1.95,1.3) L17(2.6,1.3) L18(3.25,1.3) L19(3.9,1.3) L20(4.55,1.3) L21(5.2,1.3) L22(5.85,1.3) L23(6.5,1.3) L24(7.15,1.3) L25(7.8,1.3) M1(-7.8,0.65) M2(-7.15,0.65) M3(-6.5,0.65) M4(-5.85,0.65) M5(-5.2,0.65) M6(-4.55,0.65) M7(-3.9,0.65) M8(-3.25,0.65) M9(-2.6,0.65) M10(-1.95,0.65) M11(-1.3,0.65) M12(-0.65,0.65) M13(0,0.65) M14(0.65,0.65) M15(1.3,0.65) M16(1.95,0.65) M17(2.6,0.65) M18(3.25,0.65) M19(3.9,0.65) M20(4.55,0.65) M21(5.2,0.65) M22(5.85,0.65) M23(6.5,0.65) M24(7.15,0.65) M25(7.8,0.65) N1(-7.8,0) N2(-7.15,0) N3(-6.5,0) N4(-5.85,0) N5(-5.2,0) N6(-4.55,0) N7(-3.9,0) N8(-3.25,0) N9(-2.6,0) N10(-1.95,0) N11(-1.3,0) N12(-0.65,0) N13(0,0) N14(0.65,0) N15(1.3,0) N16(1.95,0) N17(2.6,0) N18(3.25,0) N19(3.9,0) N20(4.55,0) N21(5.2,0) N22(5.85,0) N23(6.5,0) N24(7.15,0) N25(7.8,0) P1(-7.8,-0.65) P2(-7.15,-0.65) P3(-6.5,-0.65) P4(-5.85,-0.65) P5(-5.2,-0.65) P6(-4.55,-0.65) P7(-3.9,-0.65) P8(-3.25,-0.65) P9(-2.6,-0.65) P10(-1.95,-0.65) P11(-1.3,-0.65) P12(-0.65,-0.65) P13(0,-0.65) P14(0.65,-0.65) P15(1.3,-0.65) P16(1.95,-0.65) P17(2.6,-0.65) P18(3.25,-0.65) P19(3.9,-0.65) P20(4.55,-0.65) P21(5.2,-0.65) P22(5.85,-0.65) P23(6.5,-0.65) P24(7.15,-0.65) P25(7.8,-0.65) R1(-7.8,-1.3) R2(-7.15,-1.3) R3(-6.5,-1.3) R4(-5.85,-1.3) R5(-5.2,-1.3) R6(-4.55,-1.3) R7(-3.9,-1.3) R8(-3.25,-1.3) R9(-2.6,-1.3) R10(-1.95,-1.3) R11(-1.3,-1.3) R12(-0.65,-1.3) R13(0,-1.3) R14(0.65,-1.3) R15(1.3,-1.3) R16(1.95,-1.3) R17(2.6,-1.3) R18(3.25,-1.3) R19(3.9,-1.3) R20(4.55,-1.3) R21(5.2,-1.3) R22(5.85,-1.3) R23(6.5,-1.3) R24(7.15,-1.3) R25(7.8,-1.3) T1(-7.8,-1.95) T2(-7.15,-1.95) T3(-6.5,-1.95) T4(-5.85,-1.95) T5(-5.2,-1.95) T6(-4.55,-1.95) T7(-3.9,-1.95) T8(-3.25,-1.95) T9(-2.6,-1.95) T10(-1.95,-1.95) T11(-1.3,-1.95) T12(-0.65,-1.95) T13(0,-1.95) T14(0.65,-1.95) T15(1.3,-1.95) T16(1.95,-1.95) T17(2.6,-1.95) T18(3.25,-1.95) T19(3.9,-1.95) T20(4.55,-1.95) T21(5.2,-1.95) T22(5.85,-1.95) T23(6.5,-1.95) T24(7.15,-1.95) T25(7.8,-1.95) U1(-7.8,-2.6) U2(-7.15,-2.6) U3(-6.5,-2.6) U4(-5.85,-2.6) U5(-5.2,-2.6) U6(-4.55,-2.6) U7(-3.9,-2.6) U8(-3.25,-2.6) U9(-2.6,-2.6) U10(-1.95,-2.6) U11(-1.3,-2.6) U12(-0.65,-2.6) U13(0,-2.6) U14(0.65,-2.6) U15(1.3,-2.6) U16(1.95,-2.6) U17(2.6,-2.6) U18(3.25,-2.6) U19(3.9,-2.6) U20(4.55,-2.6) U21(5.2,-2.6) U22(5.85,-2.6) U23(6.5,-2.6) U24(7.15,-2.6) U25(7.8,-2.6) V1(-7.8,-3.25) V2(-7.15,-3.25) V3(-6.5,-3.25) V4(-5.85,-3.25) V5(-5.2,-3.25) V6(-4.55,-3.25) V7(-3.9,-3.25) V8(-3.25,-3.25) V9(-2.6,-3.25) V10(-1.95,-3.25) V11(-1.3,-3.25) V12(-0.65,-3.25) V13(0,-3.25) V14(0.65,-3.25) V15(1.3,-3.25) V16(1.95,-3.25) V17(2.6,-3.25) V18(3.25,-3.25) V19(3.9,-3.25) V20(4.55,-3.25) V21(5.2,-3.25) V22(5.85,-3.25) V23(6.5,-3.25) V24(7.15,-3.25) V25(7.8,-3.25) W1(-7.8,-3.9) W2(-7.15,-3.9) W3(-6.5,-3.9) W4(-5.85,-3.9) W5(-5.2,-3.9) W6(-4.55,-3.9) W7(-3.9,-3.9) W8(-3.25,-3.9) W9(-2.6,-3.9) W10(-1.95,-3.9) W11(-1.3,-3.9) W12(-0.65,-3.9) W13(0,-3.9) W14(0.65,-3.9) W15(1.3,-3.9) W16(1.95,-3.9) W17(2.6,-3.9) W18(3.25,-3.9) W19(3.9,-3.9) W20(4.55,-3.9) W21(5.2,-3.9) W22(5.85,-3.9) W23(6.5,-3.9) W24(7.15,-3.9) W25(7.8,-3.9) Y1(-7.8,-4.55) Y2(-7.15,-4.55) Y3(-6.5,-4.55) Y4(-5.85,-4.55) Y5(-5.2,-4.55) Y6(-4.55,-4.55) Y7(-3.9,-4.55) Y8(-3.25,-4.55) Y9(-2.6,-4.55) Y10(-1.95,-4.55) Y11(-1.3,-4.55) Y12(-0.65,-4.55) Y13(0,-4.55) Y14(0.65,-4.55) Y15(1.3,-4.55) Y16(1.95,-4.55) Y17(2.6,-4.55) Y18(3.25,-4.55) Y19(3.9,-4.55) Y20(4.55,-4.55) Y21(5.2,-4.55) Y22(5.85,-4.55) Y23(6.5,-4.55) Y24(7.15,-4.55) Y25(7.8,-4.55)
Top Overlay:
  circle w0.25: c-9,9 r0.125
  region: -7.934,8.5 -8.5,7.934 -8.5,8.5
  lines w0.2: -8.5,7.934 -7.934,8.5 ; -8.5,-8.5 -8.5,8.5 8.5,8.5 8.5,-8.5 -8.5,-8.5
Mechanical 13:
  circle w0.3: c-9,9 r0.078
  lines w0.3: -8.5,-8.5 -8.5,8.5 8.5,8.5 8.5,-8.5 -8.5,-8.5
  text ".Designator" at -4.998,-0.333 h1
Mechanical 15:
  lines w0.05: -8.75,-8.75 -8.75,8.75 8.75,8.75 8.75,-8.75 -8.75,-8.75
  lines w0.1: -0.5,0 0.5,0 ; 0,-0.5 0,0.5
3D body "BGA621-17X17-0MM65.step": height 2.18, standoff 0, extent -8.5,-8.5 8.5,8.5